# Altium footprint library Transistor$.PcbLib: 22 footprints (part 2 of 2)
Each footprint in its own frame and in the unit in brackets; x right, y up, seen from the top. Pads: shape width x height; smd on the part's side, far side on the other; paste and mask are expansions set on the pad; w line width, h text height; cw(c..) or ccw(c..) is an arc to the next point about the centre after c.
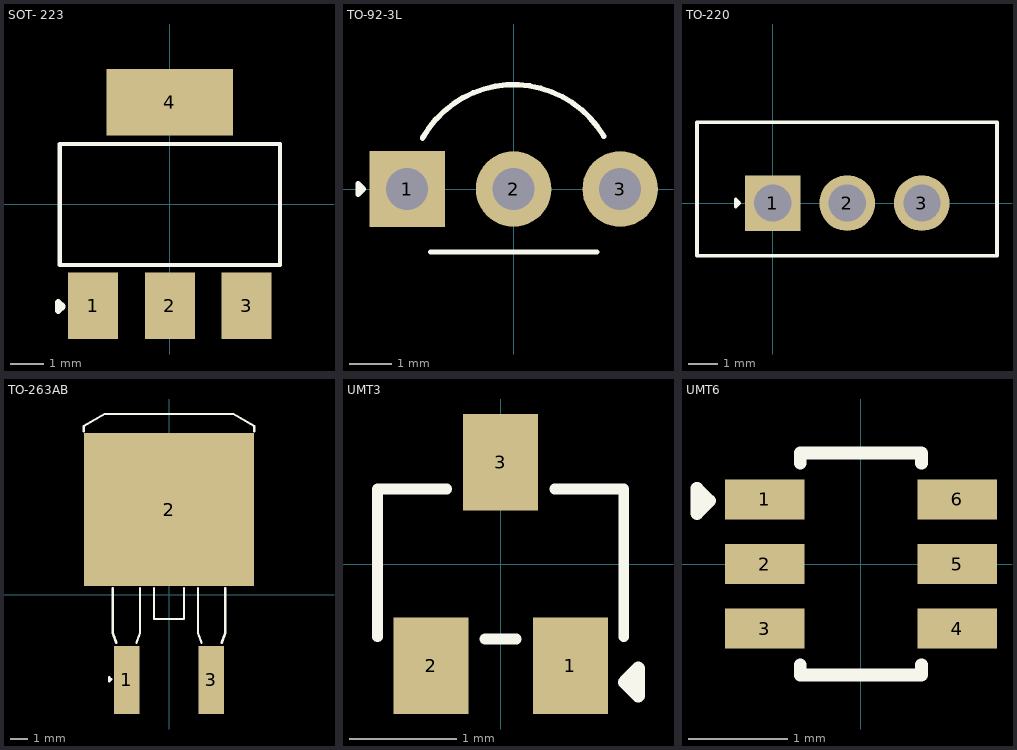
[diagram p1: the footprints below, top view; thin cyan lines are the x and y axes]

## SOT- 223 [mm]
pads (4):
  rect 1.5x2 smd: 1(-2.3,-3.05) 2(0,-3.05) 3(2.3,-3.05)
  rect 3.8x2 smd: 4(0,3.05)
Top Overlay:
  lines w0.127: -3.302,-1.829 3.302,-1.829 3.302,1.803 -3.302,1.803 -3.302,-1.829
  lines w0.2: -3.353,-3.2 -3.226,-3.073 -3.353,-2.946 -3.353,-3.2
3D body "User Library-SOT-223-1.step": height 1.61, standoff -0.04, extent -3.25,-3.5 3.25,3.5

## TO-92-3L [mm]
pads (3):
  rect 1.8x1.8 hole 1 paste+0 mask+0.051: 1(-2.54,0)
  round 1.8 hole 1 paste+0 mask+0.051: 2(0,0) 3(2.54,0)
Top Overlay:
  lines w0.127: -2.171,1.211 cw(c0,0) 2.144,1.26 ; -1.98,-1.5 1.98,-1.5 ; -3.708,-0.127 -3.581,0 -3.708,0.127 -3.708,-0.127
3D body "C258144.step": height 7.79, standoff -3.5, extent -2.77,-1.501 2.77,2.2

## TO-220 [mm]
pads (3):
  rect 1.905x1.905 hole 1.27: 1(0,0)
  round 1.905 hole 1.27: 2(2.55,0) 3(5.1,0)
Top Overlay:
  lines w0.127: -2.591,-1.803 7.671,-1.803 7.671,2.769 -2.591,2.769 -2.591,-1.803 ; -1.27,-0.127 -1.27,0.127 -1.143,0 -1.27,-0.127
3D body "step_temp.STEP": height 19.65, standoff -10.25, extent -2.56,-1.778 7.64,2.722

## TO-263AB [mil]
pads (3):
  rect 59.1x157.5 smd paste+0 mask+2: 1(-98,-196.99) 3(98,-196.99)
  rect 393.7x354.3 smd paste+0 mask+2: 2(-0.02,196.99)
Top Overlay:
  lines w5: -197.03,378.01 -197.03,390.01 -149.03,418.01 148.97,418.01 196.97,390.01 196.97,378.01 ; -130.03,15.02 -130.03,-87.98 -122.03,-110.98 ; -75.03,-110.98 -67.03,-87.98 -67.03,15.02 ; -35.02,15.02 -35.02,-55.98 34.98,-55.98 34.98,15.02 ; 66.97,15.02 66.97,-87.98 74.97,-110.98 ; 121.97,-110.98 129.97,-87.98 129.97,15.02 ; -138.1,-200.69 -133.1,-195.69 -138.1,-190.69 -138.1,-200.69
3D body "C37520.step": height 173.62, standoff 0, extent -199.57,-188 202,402.48

## UMT3 [mm]
pads (3):
  rect 0.7x0.9 smd paste+0 mask+0.051: 1(0.65,-0.95) 2(-0.65,-0.95) 3(0,0.95)
Top Overlay:
  lines w0.1: -1.149,-0.68 -1.149,0.7 -0.504,0.7 ; -0.146,-0.7 0.146,-0.7 ; 0.504,0.7 1.149,0.7 1.149,-0.68
  lines w0.127: 1.158,-1.102 1.285,-1.229 1.285,-0.975 1.158,-1.102
3D body "User Library-SOT323 (SC70-3)-1.STEP": height 1.1, standoff 0, extent -1.1,-1.123 1.1,1.123

## UMT6 [mm] "Dual Digital Transistors"
pads (6):
  rect 0.8x0.4 smd: 1(-0.97,0.65) 2(-0.97,0) 3(-0.97,-0.65) 4(0.97,-0.65) 5(0.97,0) 6(0.97,0.65)
Top Overlay:
  lines w0.127: -0.61,-1.016 -0.61,-1.118 0.61,-1.118 0.61,-1.016 ; -0.61,1.016 -0.61,1.118 0.61,1.118 0.61,1.016 ; -1.651,0.508 -1.524,0.635 -1.651,0.762 -1.651,0.508
3D body "User Library-SOT363-2.STEP": height 1.08, standoff -0.02, extent -1.2,-1.1 1.2,1.1